# Altium footprint library RRH62000.PcbLib: 1 footprints
Each footprint in its own frame and in the unit in brackets; x right, y up, seen from the top. Pads: shape width x height; smd on the part's side, far side on the other; paste and mask are expansions set on the pad; w line width, h text height; cw(c..) or ccw(c..) is an arc to the next point about the centre after c.
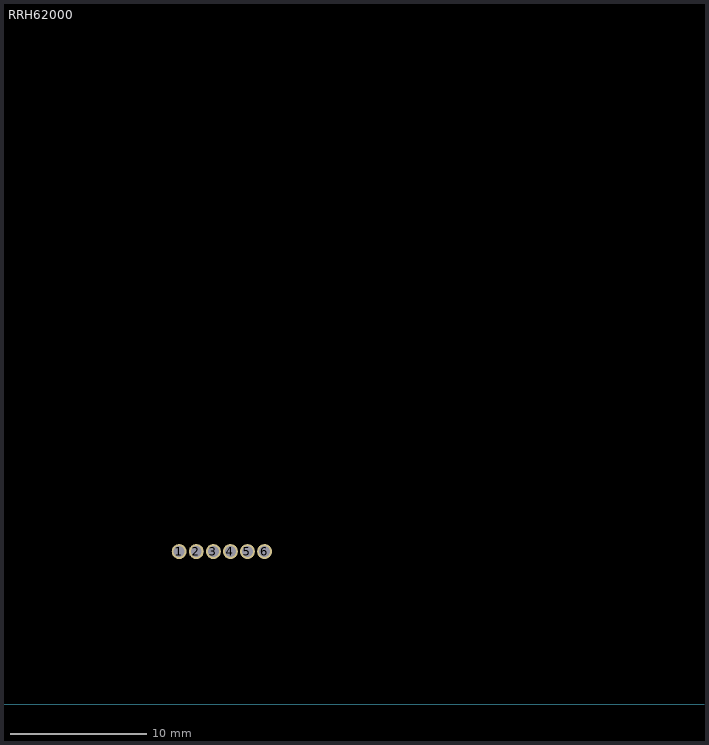
[diagram p0: the footprint, top view; thin cyan lines are the x and y axes]

## RRH62000 [mm] "PM Sensor"
pads (6):
  round 1.1 hole 0.8 paste-2539.97 mask+0.102: 1(16.296,11.176) 2(17.546,11.176) 3(18.796,11.176) 4(20.046,11.176) 5(21.296,11.176) 6(22.546,11.176)
Bottom Overlay:
  lines w0.2: 15.221,12.694 15.221,9.676 23.621,9.676 23.621,12.701 15.228,12.701 ; 17.196,20.676 ccw(c17.196,30.176) 26.696,30.176 ; 17.196,20.676 ccw(c17.196,30.176) 26.696,30.176 ; 17.196,20.676 17.196,24.176 ; 17.196,20.676 17.196,24.176 ; 17.196,24.176 ccw(c17.196,30.176) 23.196,30.176 ; 17.196,24.176 ccw(c17.196,30.176) 23.196,30.176 ; 23.196,30.176 26.696,30.176 ; 23.196,30.176 26.696,30.176 ; 5.796,6.776 5.796,41.576 52.396,41.576 52.396,6.776 5.796,6.776 ; 8.969,34.926 ccw(c17.196,30.176) 12.446,21.949 14.196,24.98 cw(c17.196,30.176) 12,33.176 8.969,34.926 ; 12.446,38.403 cw(c17.196,30.176) 25.423,34.926 22.392,33.176 ccw(c17.196,30.176) 14.196,35.372 12.446,38.403 ; 48.196,32.376 51.196,32.376 51.196,40.376 48.196,40.376 48.196,32.376
  text "RRH62000-PM" at 29.317,9.96 h1.52
3D body "Untitled.step": height 14, standoff -2, extent 5.842,6.73 52.442,41.53